# Altium footprint library Switches.PcbLib: 69 footprints (part 2 of 5)
Each footprint in its own frame and in the unit in brackets; x right, y up, seen from the top. Pads: shape width x height; smd on the part's side, far side on the other; paste and mask are expansions set on the pad; w line width, h text height; cw(c..) or ccw(c..) is an arc to the next point about the centre after c.
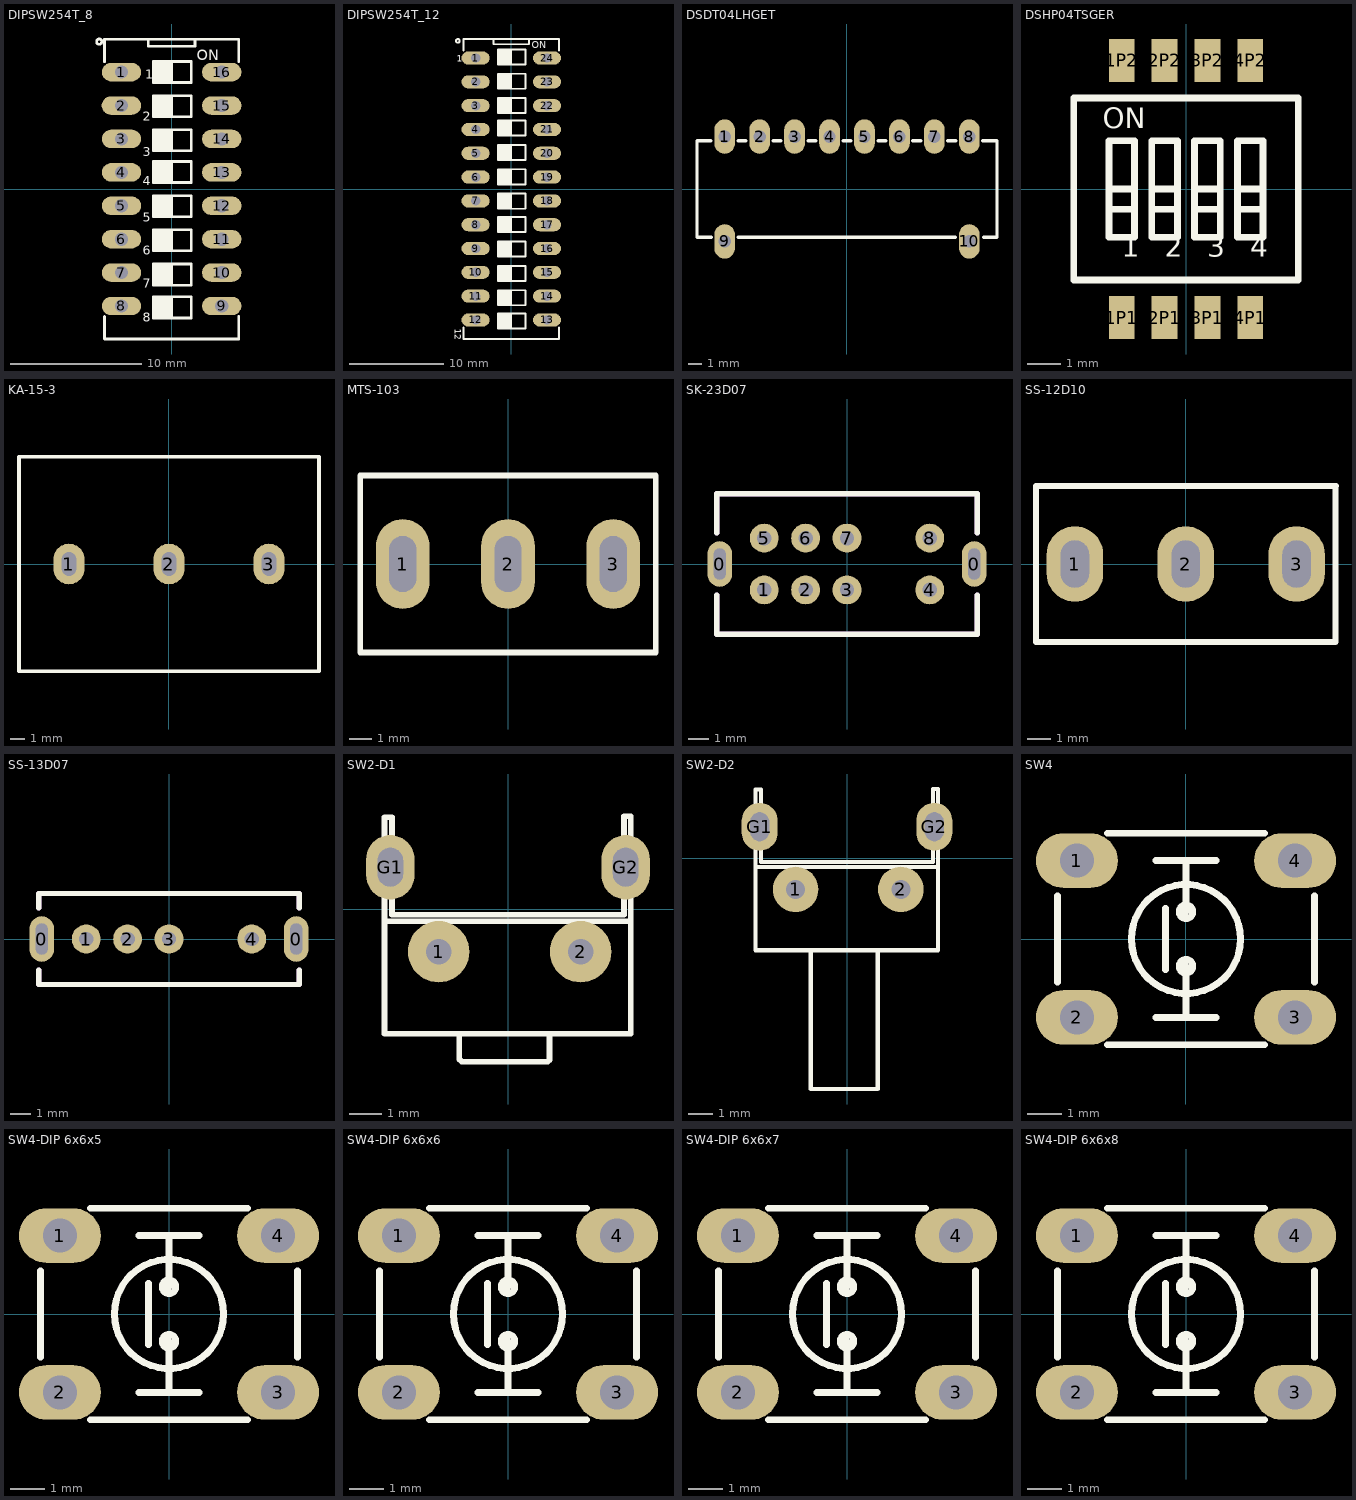
[diagram p1: the footprints below, top view; thin cyan lines are the x and y axes]

## DIPSW254T_8 [mm] "SWITCH DIP 8POS, THD, 2.54mm,"
height 6.5
pads (16):
  oval 3x1.4 / inner round 1.4 / far side oval 2.2x1.4 hole 1: 1(-3.805,8.89) 2(-3.815,6.35) 3(-3.805,3.81) 4(-3.805,1.27) 5(-3.805,-1.27) 6(-3.805,-3.81) 7(-3.805,-6.35) 8(-3.805,-8.89) 9(3.815,-8.89) 10(3.815,-6.35) 11(3.815,-3.81) 12(3.815,-1.27) 13(3.815,1.27) 14(3.815,3.81) 15(3.815,6.35) 16(3.815,8.89)
Top Overlay:
  circle w0.2: c-5.5,11.21 r0.2
  rectangle: -1.4,8.1 0.1,9.7
  rectangle: -1.4,5.5 0.1,7.1
  rectangle: -1.4,2.9 0.1,4.5
  rectangle: -1.4,0.5 0.1,2.1
  rectangle: -1.4,-2.1 0.1,-0.5
  rectangle: -1.4,-4.7 0.1,-3.1
  rectangle: -1.4,-7.3 0.1,-5.7
  rectangle: -1.4,-9.8 0.1,-8.2
  lines w0.2: -5.095,-9.69 -5.095,-11.4 5.105,-11.4 5.105,-9.69 ; -5.095,9.69 -5.095,11.4 5.105,11.4 5.105,9.69 ; -1.773,11.371 -1.773,10.863 1.783,10.863 1.783,11.371 ; -1.4,-9.8 -1.4,-8.2 1.5,-8.2 1.5,-9.8 -1.4,-9.8 ; -1.4,-7.3 -1.4,-5.7 1.5,-5.7 1.5,-7.3 -1.4,-7.3 ; -1.4,-4.7 -1.4,-3.1 1.5,-3.1 1.5,-4.7 -1.4,-4.7 ; -1.4,-2.1 -1.4,-0.5 1.5,-0.5 1.5,-2.1 -1.4,-2.1 ; -1.4,0.5 -1.4,2.1 1.5,2.1 1.5,0.5 -1.4,0.5 ; -1.4,2.9 -1.4,4.5 1.5,4.5 1.5,2.9 -1.4,2.9 ; -1.4,5.5 -1.4,7.1 1.5,7.1 1.5,5.5 -1.4,5.5 ; -1.4,8.1 -1.4,9.7 1.5,9.7 1.5,8.1 -1.4,8.1
  text "ON" at 1.9,9.8 h0.8
  text "1" at -2,8.4 h0.7
  text "2" at -2.2,5.2 h0.7
  text "3" at -2.2,2.5 h0.7
  text "4" at -2.2,0.3 h0.7
  text "5" at -2.2,-2.5 h0.7
  text "6" at -2.2,-5 h0.7
  text "7" at -2.2,-7.5 h0.7
  text "8" at -2.2,-10.1 h0.7
Top Designator:
  text ".Designator" at -3.902,-0.339 h1.52
3D body "SW3dPS-DIP SWITCH 8 POS CTS 206.STEP": height 8.25, standoff -3.5, extent -4.89,-11.25 4.89,11.25

## DIPSW254T_12 [mm] "SWITCH DIP 12POS, THD, 2.54mm,"
pads (24):
  oval 3x1.4 / inner round 1.4 / far side oval 2.2x1.4 hole 1: 1(-3.81,13.97) 2(-3.81,11.43) 3(-3.81,8.89) 4(-3.81,6.35) 5(-3.81,3.81) 6(-3.81,1.27) 7(-3.81,-1.27) 8(-3.81,-3.81) 9(-3.81,-6.35) 10(-3.81,-8.89) 11(-3.81,-11.43) 12(-3.81,-13.97) 13(3.81,-13.97) 14(3.81,-11.43) 15(3.81,-8.89) 16(3.81,-6.35) 17(3.81,-3.81) 18(3.81,-1.27) 19(3.81,1.27) 20(3.81,3.81) 21(3.81,6.35) 22(3.81,8.89) 23(3.81,11.43) 24(3.81,13.97)
Top Overlay:
  circle w0.2: c-5.7,15.8 r0.2
  rectangle: -1.4,-7.2 0.1,-5.6
  rectangle: -1.4,-9.8 0.1,-8.2
  rectangle: -1.4,-12.4 0.1,-10.8
  rectangle: -1.4,-14.9 0.1,-13.3
  rectangle: -1.4,-4.6 0.1,-3
  rectangle: -1.4,-2.1 0.1,-0.5
  rectangle: -1.4,0.5 0.1,2.1
  rectangle: -1.4,3.1 0.1,4.7
  rectangle: -1.4,5.7 0.1,7.3
  rectangle: -1.4,8.1 0.1,9.7
  rectangle: -1.4,10.7 0.1,12.3
  rectangle: -1.4,13.3 0.1,14.9
  lines w0.2: -5.1,-14.77 -5.1,-16 5.1,-16 5.1,-14.77 ; -5.1,14.77 -5.1,16 5.1,16 5.1,14.77 ; -1.91,15.951 -1.91,15.443 1.9,15.443 1.9,15.951 ; -1.4,-14.9 -1.4,-13.3 1.5,-13.3 1.5,-14.9 -1.4,-14.9 ; -1.4,-12.4 -1.4,-10.8 1.5,-10.8 1.5,-12.4 -1.4,-12.4 ; -1.4,-9.8 -1.4,-8.2 1.5,-8.2 1.5,-9.8 -1.4,-9.8 ; -1.4,-7.2 -1.4,-5.6 1.5,-5.6 1.5,-7.2 -1.4,-7.2 ; -1.4,-4.6 1.5,-4.6 1.5,-3 -1.4,-3 -1.4,-4.6 ; -1.4,-2.1 1.5,-2.1 1.5,-0.5 -1.4,-0.5 -1.4,-2.1 ; -1.4,0.5 1.5,0.5 1.5,2.1 -1.4,2.1 -1.4,0.5 ; -1.4,3.1 1.5,3.1 1.5,4.7 -1.4,4.7 -1.4,3.1 ; -1.4,5.7 1.5,5.7 1.5,7.3 -1.4,7.3 -1.4,5.7 ; -1.4,8.1 1.5,8.1 1.5,9.7 -1.4,9.7 -1.4,8.1 ; -1.4,10.7 1.5,10.7 1.5,12.3 -1.4,12.3 -1.4,10.7 ; -1.4,13.3 1.5,13.3 1.5,14.9 -1.4,14.9 -1.4,13.3
  text "ON" at 2.2,15 h0.75
  text "12" at -6.01,-14.93 h0.7
  text "1" at -5.8,13.6 h0.7
Mechanical 1:
  circle w0.025: c-3.81,-3.81 r0.254
  circle w0.025: c3.81,-3.81 r0.254
  circle w0.025: c-3.81,-1.27 r0.254
  circle w0.025: c-3.81,1.27 r0.254
  circle w0.025: c3.81,1.27 r0.254
  circle w0.025: c3.81,3.81 r0.254
  circle w0.025: c-3.81,3.81 r0.254
  circle w0.025: c-3.81,13.97 r0.254
  circle w0.025: c-3.82,11.43 r0.254
  circle w0.025: c-3.81,8.89 r0.254
  circle w0.025: c-3.81,6.35 r0.254
  circle w0.025: c3.81,6.35 r0.254
  circle w0.025: c3.81,8.89 r0.254
  circle w0.025: c3.81,11.43 r0.254
  circle w0.025: c3.81,13.97 r0.254
Top Designator:
  text ".Designator" at -4.085,-0.359 h1.52
3D body: height 0.76, standoff 0, extent 3.557,-6.603 4.063,-6.097
3D body: height 0.76, standoff 0, extent 3.557,-9.143 4.063,-8.637
3D body: height 0.76, standoff 0, extent 3.557,-11.683 4.063,-11.177
3D body: height 0.76, standoff 0, extent 3.557,-14.223 4.063,-13.717
3D body: height 0.76, standoff 0, extent -4.063,-14.223 -3.557,-13.717
3D body: height 0.76, standoff 0, extent -4.063,-11.683 -3.557,-11.177
3D body: height 0.76, standoff 0, extent -4.063,-9.143 -3.557,-8.637
3D body: height 0.76, standoff 0, extent -4.063,-6.603 -3.557,-6.097
3D body: height 0.76, standoff 0, extent -4.063,-4.063 -3.557,-3.557
3D body: height 0.76, standoff 0, extent -4.063,-1.523 -3.557,-1.017
3D body: height 0.76, standoff 0, extent -4.063,1.017 -3.557,1.523
3D body: height 0.76, standoff 0, extent -4.063,3.557 -3.557,4.063
3D body: height 0.76, standoff 0, extent 3.557,1.017 4.063,1.523
3D body: height 0.76, standoff 0, extent 3.557,-4.063 4.063,-3.557
3D body: height 0.76, standoff 0, extent 3.557,-1.523 4.063,-1.017
3D body: height 0.76, standoff 0, extent 3.557,13.717 4.063,14.223
3D body: height 0.76, standoff 0, extent 3.557,11.177 4.063,11.683
3D body: height 0.76, standoff 0, extent 3.557,8.637 4.063,9.143
3D body: height 0.76, standoff 0, extent 3.557,6.097 4.063,6.603
3D body: height 0.76, standoff 0, extent -4.063,13.717 -3.557,14.223
3D body: height 0.76, standoff 0, extent -4.073,11.177 -3.567,11.683
3D body: height 0.76, standoff 0, extent -4.063,8.637 -3.557,9.143
3D body: height 0.76, standoff 0, extent -4.063,6.097 -3.557,6.603
3D body: height 3.81, standoff 0, extent -1.91,15.443 1.9,15.951
3D body: height 5.59, standoff 0, extent -4.953,-16.002 4.953,15.951
3D body: height 0.25, standoff 0.05, extent -4.953,-16.002 4.953,15.951
3D body: height 5.59, standoff 0, extent -1.448,14.732 1.443,15.443
3D body: height 5.59, standoff 0.25, extent 2.195,13.308 3.769,14.926
3D body: height 5.59, standoff 0.03, extent 2.28,13.716 3.697,14.524
3D body: height 5.59, standoff 0.25, extent 2.205,11.605 3.757,13.171
3D body: height 6.35, standoff 0.25, extent -1.448,13.208 -0.737,14.732
3D body: height 5.08, standoff 0.25, extent -0.737,13.208 1.443,14.732
3D body: height 5.08, standoff 0.25, extent -0.737,8.128 1.443,9.652
3D body: height 6.35, standoff 0.25, extent -1.448,8.128 -0.737,9.652
3D body: height 5.08, standoff 0.25, extent -0.737,5.588 1.443,7.112
3D body: height 6.35, standoff 0.25, extent -1.448,5.588 -0.737,7.112
3D body: height 5.59, standoff 0, extent -1.448,12.192 1.443,13.208
3D body: height 5.59, standoff 0, extent -1.448,7.112 1.443,8.128
3D body: height 5.59, standoff 0, extent -1.448,9.652 1.443,10.668
3D body: height 5.08, standoff 0.25, extent -0.737,10.668 1.443,12.192
3D body: height 6.35, standoff 0.25, extent -1.448,10.668 -0.737,12.192
3D body: height 6.35, standoff 0.25, extent -1.448,3.048 -0.737,4.572
3D body: height 5.08, standoff 0.25, extent -0.737,3.048 1.443,4.572
3D body: height 5.59, standoff 0, extent -1.448,4.572 1.443,5.588
3D body: height 6.35, standoff 0.25, extent -1.448,0.508 -0.737,2.032
3D body: height 5.08, standoff 0.25, extent -0.737,0.508 1.443,2.032
3D body: height 5.59, standoff 0, extent -1.448,2.032 1.443,3.048
3D body: height 6.35, standoff 0.25, extent -1.448,-2.032 -0.737,-0.508
3D body: height 5.08, standoff 0.25, extent -0.737,-2.032 1.443,-0.508
3D body: height 5.59, standoff 0, extent -1.448,-0.508 1.443,0.508
3D body: height 6.35, standoff 0.25, extent -1.448,-4.572 -0.737,-3.048
3D body: height 5.08, standoff 0.25, extent -0.737,-4.572 1.443,-3.048
3D body: height 5.59, standoff 0, extent -1.448,-3.048 1.443,-2.032
3D body: height 6.35, standoff 0.25, extent -1.448,-7.112 -0.737,-5.588
3D body: height 5.08, standoff 0.25, extent -0.737,-7.112 1.443,-5.588
3D body: height 5.59, standoff 0, extent -1.448,-5.588 1.443,-4.572
3D body: height 6.35, standoff 0.25, extent -1.448,-9.652 -0.737,-8.128
3D body: height 5.08, standoff 0.25, extent -0.737,-9.652 1.443,-8.128
3D body: height 5.59, standoff 0, extent -1.448,-8.128 1.443,-7.112
3D body: height 6.35, standoff 0.25, extent -1.448,-12.192 -0.737,-10.668
3D body: height 5.08, standoff 0.25, extent -0.737,-12.192 1.443,-10.668
3D body: height 5.59, standoff 0, extent -1.448,-10.668 1.443,-9.652
3D body: height 6.35, standoff 0.25, extent -1.448,-14.732 -0.737,-13.208
3D body: height 5.08, standoff 0.25, extent -0.737,-14.732 1.443,-13.208
3D body: height 5.59, standoff 0, extent -1.448,-13.208 1.443,-12.192

## DSDT04LHGET [mm] "8 bit 3 state"
pads (10):
  oval 1.5x2.5 hole 0.9 mask+0.102: 1(-8.89,3.81) 2(-6.35,3.81) 3(-3.81,3.81) 4(-1.27,3.81) 5(1.27,3.81) 6(3.81,3.81) 7(6.35,3.81) 8(8.89,3.81) 9(-8.89,-3.81) 10(8.89,-3.81)
Top Overlay:
  lines w0.254: -9.911,3.5 -10.9,3.5 -10.9,-3.5 -9.881,-3.5 ; -7.905,-3.5 7.874,-3.5 ; -7.905,3.5 -7.346,3.5 ; -5.365,3.5 -4.806,3.5 ; -2.825,3.5 -2.266,3.5 ; -0.285,3.5 0.274,3.5 ; 2.255,3.5 2.814,3.5 ; 4.795,3.5 5.354,3.5 ; 7.335,3.5 7.894,3.5 ; 9.875,3.5 10.9,3.5 10.9,-3.5 9.931,-3.5
Top Designator:
  text ".Designator" at -3.71,-0.344 h1.52

## DSHP04TSGER [mm]
pads (8):
  rect 0.76x1.27 smd: 1P1(-1.905,-3.81) 1P2(-1.905,3.81) 2P1(-0.635,-3.81) 2P2(-0.635,3.81) 3P1(0.635,-3.81) 3P2(0.635,3.81) 4P1(1.905,-3.81) 4P2(1.905,3.81)
Top Overlay:
  lines w0.2: -2.285,-0.6 -2.285,0 ; -2.285,-0.6 -2.285,-1.43 -1.525,-1.43 -1.525,-0.6 ; -2.285,-0.6 -1.525,-0.6 ; -2.285,0 -2.285,1.43 -1.525,1.43 -1.525,0 ; -2.285,0 -1.525,0 ; -1.525,-0.6 -1.525,0 ; -1.015,-0.6 -1.015,0 ; -1.015,-0.6 -1.015,-1.43 -0.255,-1.43 -0.255,-0.6 ; -1.015,-0.6 -0.255,-0.6 ; -1.015,0 -1.015,1.43 -0.255,1.43 -0.255,0 ; -1.015,0 -0.255,0 ; -0.255,-0.6 -0.255,0 ; 0.255,-0.6 0.255,0 ; 0.255,-0.6 0.255,-1.43 1.015,-1.43 1.015,-0.6 ; 0.255,-0.6 1.015,-0.6 ; 0.255,0 0.255,1.43 1.015,1.43 1.015,0 ; 0.255,0 1.015,0 ; 1.015,-0.6 1.015,0 ; 1.525,-0.6 1.525,0 ; 1.525,-0.6 1.525,-1.43 2.285,-1.43 2.285,-0.6 ; 1.525,-0.6 2.285,-0.6 ; 1.525,0 1.525,1.43 2.285,1.43 2.285,0 ; 1.525,0 2.285,0 ; 2.285,-0.6 2.285,0 ; -3.33,-2.7 3.33,-2.7 3.33,2.7 -3.33,2.7 -3.33,-2.7
  text "ON" at -2.473,1.802 h0.6
  text "1" at -1.908,-2.003 h0.6
  text "2" at -0.636,-2.004 h0.6
  text "3" at 0.636,-2.003 h0.6
  text "4" at 1.906,-2.001 h0.6

## KA-15-3 [mm] "21x15mm"
pads (3):
  oval 2.2x2.85 hole 1 slot 1.65 at 90 deg: 1(-7,0) 2(0,0) 3(7,0)
Top Overlay:
  lines w0.254: -10.5,-7.5 -10.5,7.5 10.5,7.5 10.5,-7.5 -10.5,-7.5
Top Designator:
  text ".Designator" at -3.65,-0.338 h1.5

## MTS-103 [mm] "12.7 x 6.6 x 5mm"
pads (3):
  oval 2.4x4 hole 1.2 slot 2.5 at 90 deg: 1(-4.7,0) 2(0,0) 3(4.7,0)
Top Overlay:
  lines w0.254: -6.6,-3.95 -6.6,3.95 6.6,3.95 6.6,-3.95 -6.6,-3.95
Top Designator:
  text ".Designator" at -3.71,-0.344 h1.52
3D body "100SP1T1B1M1QEH--3DModel-STEP-520916.STEP": height 29.26, standoff -2.62, extent -6.35,-3.43 6.35,3.43

## SK-23D07 [mm]
pads (10):
  oval 1.2x2.2 hole 0.6 slot 1.5 at 90 deg: 0(-6.15,0) 0(6.15,0)
  round 1.4 hole 0.7: 1(-4,-1.25) 2(-2,-1.25) 3(0,-1.25) 4(4,-1.25) 5(-4,1.25) 6(-2,1.25) 7(0,1.25) 8(4,1.25)
Top Overlay:
  lines w0.254: -6.3,-1.5 -6.3,-3.4 6.3,-3.4 6.3,-1.5 ; -6.3,1.5 -6.3,3.4 6.3,3.4 6.3,1.5
Top Designator:
  lines w0.254: -6.3,-1.5 -6.3,-3.4 6.3,-3.4 6.3,-1.5 ; -6.3,1.5 -6.3,3.4 6.3,3.4 6.3,1.5
  text ".Designator" at -3.71,-0.344 h1.52
3D body "User Library-SK23D07.step": height 4.8, standoff -2.4, extent -6.35,-3.4 6.35,8.4

## SS-12D10 [mm] "12.7 x 6.6 x 5mm"
pads (3):
  oval 2.4x3.2 hole 1.2 slot 2 at 90 deg: 1(-4.7,0) 2(0,0) 3(4.7,0)
Top Overlay:
  lines w0.254: -6.35,3.3 -6.35,-3.3 6.35,-3.3 6.35,3.3 ; -6.33,3.3 6.37,3.3
Top Designator:
  text ".Designator" at -3.71,-0.344 h1.52
3D body "SS-12D10L4.STEP": height 12.1, standoff -5, extent -6.5,-3.4 6.5,3.4

## SS-13D07 [mm]
pads (6):
  oval 1.2x2.2 hole 0.6 slot 1.5 at 90 deg: 0(-6.15,0) 0(6.15,0)
  round 1.4 hole 0.7: 1(-4,0) 2(-2,0) 3(0,0) 4(4,0)
Top Overlay:
  lines w0.254: -6.3,-1.5 -6.3,-2.2 6.3,-2.2 6.3,-1.5 ; -6.3,1.5 -6.3,2.2 6.3,2.2 6.3,1.5
Top Designator:
  lines w0.254: -6.3,-1.5 -6.3,-2.2 6.3,-2.2 6.3,-1.5 ; -6.3,1.5 -6.3,2.2 6.3,2.2 6.3,1.5
  text ".Designator" at -3.71,-0.344 h1.52
3D body "ss13d07l3b.stp": height 7.7, standoff -3.1, extent -6.35,-2.2 6.35,2.2

## SW2-D1 [mil] "SW button 2pin, 300x 300 x 250 mil"
height 100
pads (4):
  round 75 hole 31: 1(-84.5,-51.5) 2(88.5,-51.5)
  oval 59.06x78.74 hole 31 slot 47.24 at 90 deg: G1(-143.5,51.5) G2(143.5,51.5)
Top Overlay:
  lines w7: -150.5,-14.5 149.5,-14.5 ; -59.5,-151.5 -59.5,-182.5 -56.5,-185.5 48.5,-185.5 50.5,-183.5 50.5,-151.5 ; -150.5,-151.5 149.5,-151.5 149.5,113.5 141.5,113.5 141.5,-6.5 -141.5,-6.5 -141.5,112.5 -150.5,112.5 -150.5,-151.5
Top Designator:
  text ".Designator" at -146.08,-49.54 h60
3D body "19950.stp": height 291.34, standoff -137.8, extent -170.76,-174.5 171.76,106.99

## SW2-D2 [mil] "SW button 2pin, 300x 300 x 250 mil"
height 100
pads (4):
  round 75 hole 31: 1(-84.5,-51.5) 2(88.5,-51.5)
  oval 59.06x78.74 hole 31 slot 47.24 at 90 deg: G1(-143.5,51.5) G2(143.5,51.5)
Top Overlay:
  lines w7: -150.5,-14.5 149.5,-14.5 ; -59.5,-151.5 -59.5,-379.5 50.5,-379.5 50.5,-151.5 ; -150.5,-151.5 -150.5,112.5 -141.5,112.5 -141.5,-6.5 141.5,-6.5 141.5,113.5 149.5,113.5 149.5,-151.5 -150.5,-151.5
Top Designator:
  text ".Designator" at -146.08,-146.54 h60
3D body "SW3dPS-Alps TACT SKHH Horizontal Switch.STEP": height 290.35, standoff -137.67, extent -163.2,-378.96 166.22,111.98

## SW4 [mm] "SW button 4pin, 250 x250 mil"
height 2.54
pads (4):
  oval 2.4x1.6 hole 1 mask+0.1: 1(-3.2,2.3) 2(-3.2,-2.3) 3(3.2,-2.3) 4(3.2,2.3)
Top Overlay:
  circle w0.2: c0,-0.8 r0.2
  circle w0.2: c0,0.8 r0.2
  circle w0.2: c0,0 r1.6
  lines w0.2: -3.772,-1.27 -3.772,1.27 ; -2.3,-3.1 2.3,-3.1 ; -2.3,3.1 2.3,3.1 ; -0.889,-2.3 0.889,-2.3 ; -0.889,2.3 0.889,2.3 ; -0.6,-0.9 -0.6,0.9 ; 0,-2.3 0,-0.8 ; 0,0.8 0,2.3 ; 3.771,-1.27 3.771,1.27
Top Designator:
  text ".Designator" at -3.71,-0.344 h1.52
3D body "TS6-THT_H-5.0.step": height 5, standoff -3.5, extent -3.949,-3 3.948,3

## SW4-DIP 6x6x5 [mm] "SW button 4pin, 250 x250 mil"
pads (4):
  oval 2.4x1.6 hole 1 mask+0.1: 1(-3.2,2.3) 2(-3.2,-2.3) 3(3.2,-2.3) 4(3.2,2.3)
Top Overlay:
  circle w0.2: c0,0 r1.6
  circle w0.2: c0,0.8 r0.2
  circle w0.2: c0,-0.8 r0.2
  lines w0.2: -3.772,-1.27 -3.772,1.27 ; -2.3,-3.1 2.3,-3.1 ; -2.3,3.1 2.3,3.1 ; -0.889,-2.3 0.889,-2.3 ; -0.889,2.3 0.889,2.3 ; -0.6,-0.9 -0.6,0.9 ; 0,-2.3 0,-0.8 ; 0,0.8 0,2.3 ; 3.771,-1.27 3.771,1.27
Top Designator:
  text ".Designator" at -3.71,-0.344 h1.52
3D body "TS6-THT_H-5.0.step": height 5, standoff -3.5, extent -3.949,-3 3.949,3

## SW4-DIP 6x6x6 [mm] "SW button 4pin, 250 x250 mil"
pads (4):
  oval 2.4x1.6 hole 1 mask+0.1: 1(-3.2,2.3) 2(-3.2,-2.3) 3(3.2,-2.3) 4(3.2,2.3)
Top Overlay:
  circle w0.2: c0,0 r1.6
  circle w0.2: c0,0.8 r0.2
  circle w0.2: c0,-0.8 r0.2
  lines w0.2: -3.772,-1.27 -3.772,1.27 ; -2.3,-3.1 2.3,-3.1 ; -2.3,3.1 2.3,3.1 ; -0.889,-2.3 0.889,-2.3 ; -0.889,2.3 0.889,2.3 ; -0.6,-0.9 -0.6,0.9 ; 0,-2.3 0,-0.8 ; 0,0.8 0,2.3 ; 3.771,-1.27 3.771,1.27
Top Designator:
  text ".Designator" at -3.71,-0.344 h1.52
3D body "6X6X6_BUTTON.STEP": height 5.5, standoff -3.95, extent -4.101,-3 4.101,3

## SW4-DIP 6x6x7 [mm] "SW button 4pin, 250 x250 mil"
pads (4):
  oval 2.4x1.6 hole 1 mask+0.1: 1(-3.2,2.3) 2(-3.2,-2.3) 3(3.2,-2.3) 4(3.2,2.3)
Top Overlay:
  circle w0.2: c0,0 r1.6
  circle w0.2: c0,0.8 r0.2
  circle w0.2: c0,-0.8 r0.2
  lines w0.2: -3.772,-1.27 -3.772,1.27 ; -2.3,-3.1 2.3,-3.1 ; -2.3,3.1 2.3,3.1 ; -0.889,-2.3 0.889,-2.3 ; -0.889,2.3 0.889,2.3 ; -0.6,-0.9 -0.6,0.9 ; 0,-2.3 0,-0.8 ; 0,0.8 0,2.3 ; 3.771,-1.27 3.771,1.27
Top Designator:
  text ".Designator" at -3.71,-0.344 h1.52
3D body "TS6-THT_H-7.0.step": height 7, standoff -3.5, extent -3.949,-3 3.949,3

## SW4-DIP 6x6x8 [mm] "SW button 4pin, 250 x250 mil"
pads (4):
  oval 2.4x1.6 hole 1 mask+0.1: 1(-3.2,2.3) 2(-3.2,-2.3) 3(3.2,-2.3) 4(3.2,2.3)
Top Overlay:
  circle w0.2: c0,0 r1.6
  circle w0.2: c0,0.8 r0.2
  circle w0.2: c0,-0.8 r0.2
  lines w0.2: -3.772,-1.27 -3.772,1.27 ; -2.3,-3.1 2.3,-3.1 ; -2.3,3.1 2.3,3.1 ; -0.889,-2.3 0.889,-2.3 ; -0.889,2.3 0.889,2.3 ; -0.6,-0.9 -0.6,0.9 ; 0,-2.3 0,-0.8 ; 0,0.8 0,2.3 ; 3.771,-1.27 3.771,1.27
Top Designator:
  text ".Designator" at -3.71,-0.344 h1.52
3D body "TS6-THT_H-8.0.step": height 8, standoff -3.5, extent -3.949,-3 3.949,3